# Altium schematic symbol library 2020-05-11_11-49-00.SchLib: 2 symbols
Pins are listed as number, name and electrical type; pins without a type are passive.

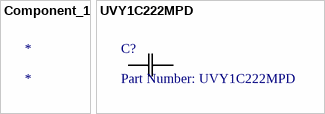
[diagram p0: symbols Component_1 to UVY1C222MPD]

## Component_1
designator *

## UVY1C222MPD
designator C?, comment Part Number: UVY1C222MPD
No Description Available; Vendor: NICHICON; Built_By: EMA_UL_Team; SourceLibrary: Nichicon_2012-08-08; Type: DEV; Manufacturer_Part_Number: UVY1C222MPD; Copyright: Copyright (C) 2018 Accelerated Designs. All rights reserved; RefDes: RefDes; Value: Value
footprint CAP_10 X 20_NCH
pins: 1, 2